# Altium footprint library SamacSys.PcbLib: 1008 footprints (part 24 of 63)
Each footprint in its own frame and in the unit in brackets; x right, y up, seen from the top. Pads: shape width x height; smd on the part's side, far side on the other; paste and mask are expansions set on the pad; w line width, h text height; cw(c..) or ccw(c..) is an arc to the next point about the centre after c.
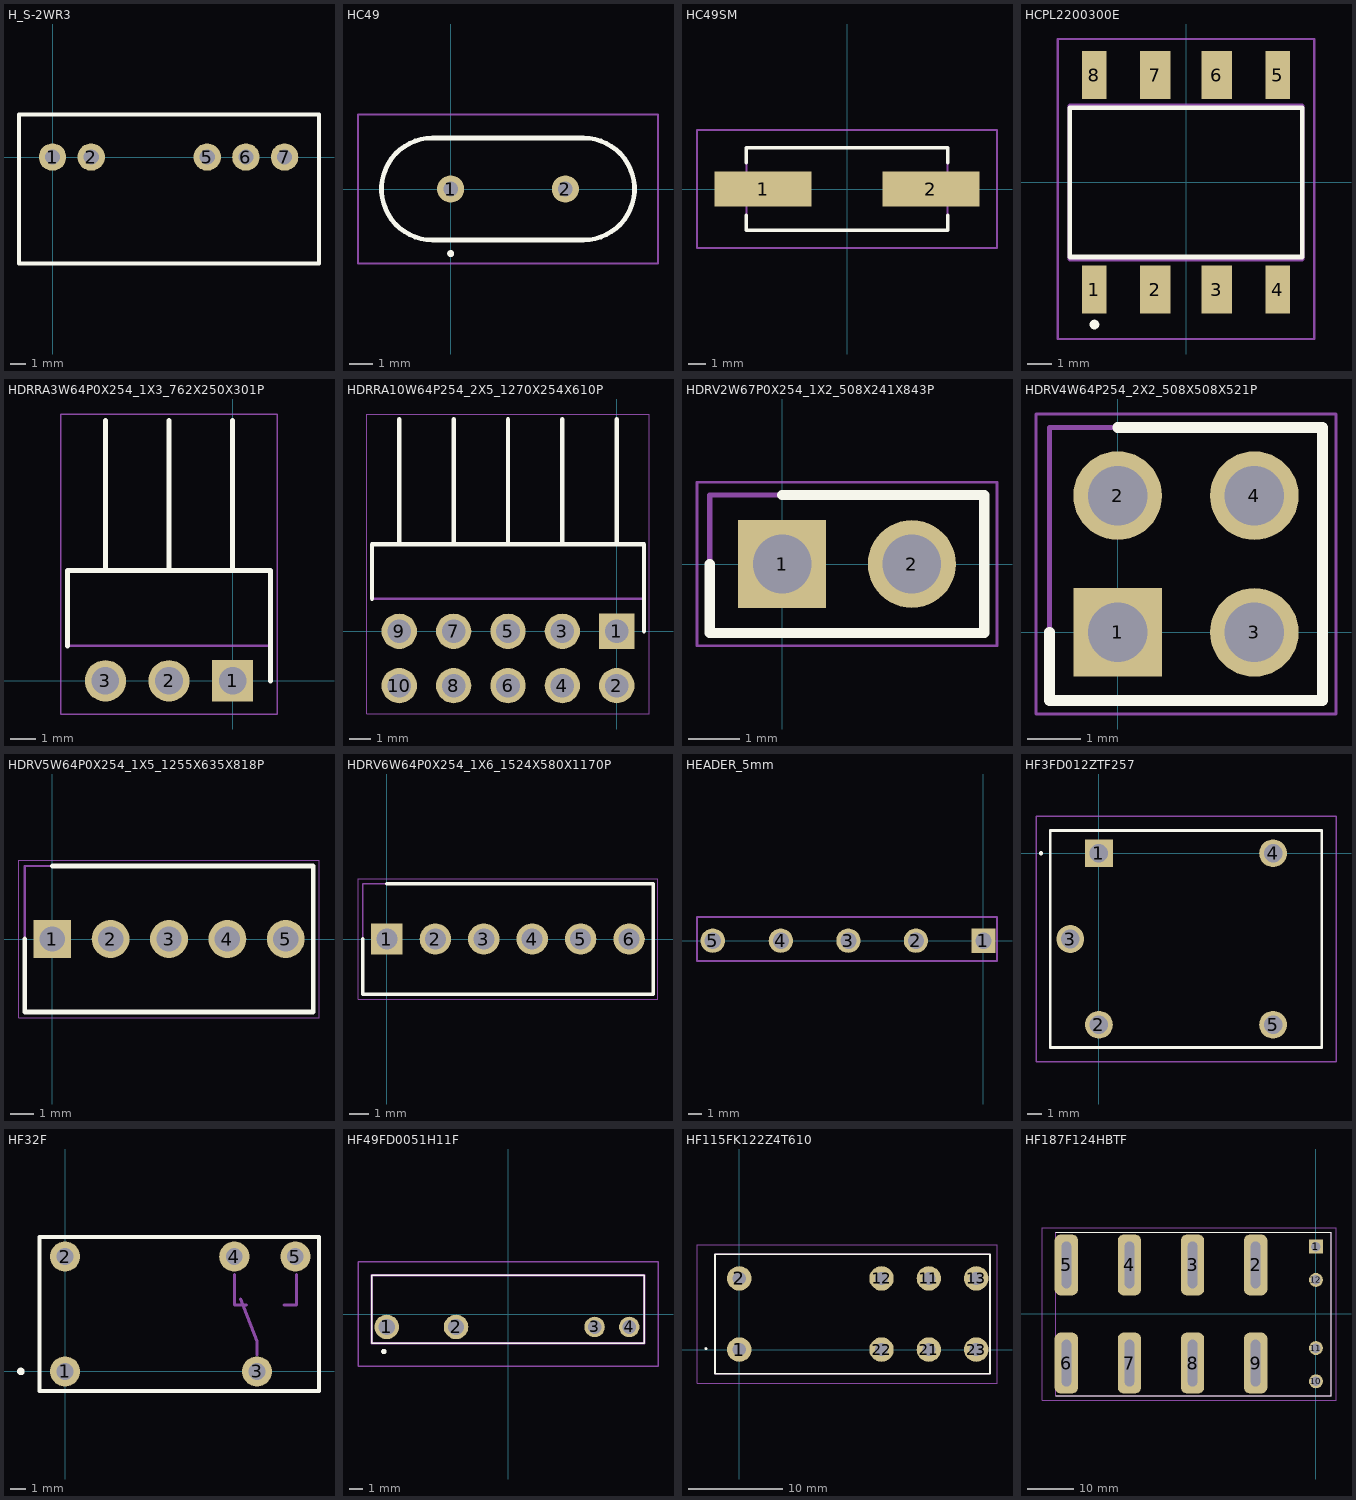
[diagram p23: the footprints below, top view; thin cyan lines are the x and y axes]

## H_S-2WR3 [mm]
height 10.6
pads (5):
  round 1.8 hole 1: 1(0,0) 2(2.54,0) 5(10.16,0) 6(12.7,0) 7(15.24,0)
Top Overlay:
  lines w0.254: -2.2,-7 17.5,-7 17.5,2.8 -2.2,2.8 -2.2,-7
Top Designator:
  text ".Designator" at 1.272,-1.905 h1.52
3D body "(G)H_S-R3.stp": height 12.5, standoff -4.1, extent -2.15,-7 17.35,2.8

## HC49 [mm]
pads (2):
  round 1.155 hole 0.63: 1(0,0) 2(4.88,0)
Top Overlay:
  lines w0.2: 0,-2.8 ccw(c0,-2.75) 0,-2.7 ; 0,-2.8 cw(c0,-2.75) 0,-2.7 ; 0,-2.8 ccw(c0,-2.75) 0,-2.7 ; -0.775,-2.17 cw(c-0.775,0) -0.775,2.17 5.655,2.17 cw(c5.655,0) 5.655,-2.17 -0.775,-2.17
Assembly:
  lines w0.1: -0.775,-2.17 cw(c-0.775,0) -0.775,2.17 5.655,2.17 cw(c5.655,0) 5.655,-2.17 -0.775,-2.17
Countryard:
  lines w0.1: -3.945,-3.17 8.825,-3.17 8.825,3.17 -3.945,3.17 -3.945,-3.17
3D body "HC 49_8MHz.STEP": height 3.5, standoff -3, extent -3.085,-2.325 7.965,2.325

## HC49SM [mm]
pads (2):
  rect 5.5x2 smd: 1(-4.75,0) 2(4.75,0)
Top Overlay:
  lines w0.2: -5.7,-2.35 -5.7,-1.5 -5.7,-2.35 ; -5.7,-2.35 5.7,-2.35 ; -5.7,-2.35 5.7,-2.35 ; -5.7,2.35 -5.7,1.5 -5.7,2.35 ; -5.7,2.35 5.7,2.35 ; -5.7,2.35 5.7,2.35 ; 5.7,-2.35 5.7,-1.5 5.7,-2.35 ; 5.7,2.35 5.7,1.5 5.7,2.35
Assembly:
  lines w0.1: -5.7,-2.35 -5.7,2.35 5.7,2.35 5.7,-2.35 -5.7,-2.35
Countryard:
  lines w0.1: -8.5,-3.35 -8.5,3.35 8.5,3.35 8.5,-3.35 -8.5,-3.35
3D body "HC-49SM.stp": height 4, standoff 0, extent -6.7,-2.4 6.7,2.4

## HCPL2200300E [mm]
pads (8):
  rect 1.016x2 smd: 1(-3.81,-4.45) 4(3.81,-4.45) 5(3.81,4.45) 8(-3.81,4.45)
  rect 1.27x2 smd: 2(-1.27,-4.45) 3(1.27,-4.45) 6(1.27,4.45) 7(-1.27,4.45)
Top Overlay:
  lines w0.2: -4.825,-3.1 4.825,-3.1 4.825,3.1 -4.825,3.1 -4.825,-3.1 ; -3.9,-5.9 cw(c-3.8,-5.9) -3.7,-5.9 cw(c-3.8,-5.9) -3.9,-5.9
Assembly:
  lines w0.2: -4.825,-3.175 4.825,-3.175 4.825,3.175 -4.825,3.175 -4.825,-3.175
Countryard:
  lines w0.1: -5.325,-6.5 5.325,-6.5 5.325,5.95 -5.325,5.95 -5.325,-6.5
3D body "HCPL-2631-300E.stp": height 3.69, standoff 0, extent -5.029,-4.953 5.029,4.953

## HDRRA3W64P0X254_1X3_762X250X301P [mm]
pads (3):
  rect 1.65x1.65 hole 1.1: 1(0,0)
  round 1.65 hole 1.1: 2(-2.54,0) 3(-5.08,0)
Top Overlay:
  lines w0.2: -6.604,1.4 -6.604,4.408 1.524,4.408 1.524,0 ; -5.08,4.408 -5.08,10.408 ; -2.54,4.408 -2.54,10.408 ; 0,4.408 0,10.408
Assembly:
  lines w0.1: -6.604,1.4 -6.604,4.408 1.524,4.408 1.524,1.4 -6.604,1.4
Countryard:
  lines w0.05: -6.854,-1.325 -6.854,10.658 1.774,10.658 1.774,-1.325 -6.854,-1.325
3D body "PH1RB-03-UA.stp": height 3.01, standoff -3.56, extent -6.604,-0.32 1.524,10.916

## HDRRA10W64P254_2X5_1270X254X610P [mm]
pads (10):
  rect 1.65x1.65 hole 1.1: 1(0,0)
  round 1.65 hole 1.1: 2(0,-2.54) 3(-2.54,0) 4(-2.54,-2.54) 5(-5.08,0) 6(-5.08,-2.54) 7(-7.62,0) 8(-7.62,-2.54) 9(-10.16,0) 10(-10.16,-2.54)
Top Overlay:
  lines w0.2: -11.43,1.52 -11.43,4.06 1.27,4.06 1.27,0 ; -10.16,4.06 -10.16,9.9 ; -7.62,4.06 -7.62,9.9 ; -5.08,4.06 -5.08,9.9 ; -2.54,4.06 -2.54,9.9 ; 0,4.06 0,9.9
Assembly:
  lines w0.1: -11.43,1.52 -11.43,4.06 1.27,4.06 1.27,1.52 -11.43,1.52
Countryard:
  lines w0.05: -11.68,-3.865 -11.68,10.15 1.52,10.15 1.52,-3.865 -11.68,-3.865
3D body "HTSW-105-08-G-D-RA.stp": height 6.1, standoff -2.29, extent -11.43,-2.86 1.27,9.9

## HDRV2W67P0X254_1X2_508X241X843P [mm]
pads (2):
  rect 1.725x1.725 hole 1.15: 1(0,0)
  round 1.725 hole 1.15: 2(2.54,0)
Top Overlay:
  lines w0.2: -1.42,0 -1.42,-1.355 3.96,-1.355 3.96,1.355 0,1.355
Assembly:
  lines w0.1: -1.42,-1.355 -1.42,1.355 3.96,1.355 3.96,-1.355 -1.42,-1.355
Countryard:
  lines w0.05: -1.67,-1.605 -1.67,1.605 4.21,1.605 4.21,-1.605 -1.67,-1.605
3D body "10129378-902001BLF.stp": height 8.43, standoff -3.3, extent -1.27,-1.205 3.81,1.205

## HDRV4W64P254_2X2_508X508X521P [mm]
pads (4):
  rect 1.65x1.65 hole 1.1: 1(0,0)
  round 1.65 hole 1.1: 2(0,2.54) 3(2.54,0) 4(2.54,2.54)
Top Overlay:
  lines w0.2: -1.27,0 -1.27,-1.27 3.81,-1.27 3.81,3.81 0,3.81
Assembly:
  lines w0.1: -1.27,-1.27 3.81,-1.27 3.81,3.81 -1.27,3.81 -1.27,-1.27
Countryard:
  lines w0.05: -1.52,-1.52 4.06,-1.52 4.06,4.06 -1.52,4.06 -1.52,-1.52
3D body "TSW-102-05-G-D.stp": height 5.21, standoff -3.3, extent -1.27,-1.27 3.81,3.81

## HDRV5W64P0X254_1X5_1255X635X818P [mm]
pads (5):
  rect 1.65x1.65 hole 1.1: 1(0,0)
  round 1.65 hole 1.1: 2(2.54,0) 3(5.08,0) 4(7.62,0) 5(10.16,0)
Top Overlay:
  lines w0.2: -1.195,0 -1.195,-3.175 11.355,-3.175 11.355,3.175 0,3.175
Assembly:
  lines w0.1: -1.195,-3.175 11.355,-3.175 11.355,3.175 -1.195,3.175 -1.195,-3.175
Countryard:
  lines w0.05: -1.445,-3.425 11.605,-3.425 11.605,3.425 -1.445,3.425 -1.445,-3.425
3D body "22-23-2051.stp": height 10.66, standoff -3.56, extent -1.194,-3.171 11.354,3.179

## HDRV6W64P0X254_1X6_1524X580X1170P [mm]
pads (6):
  rect 1.65x1.65 hole 1.1: 1(0,0)
  round 1.65 hole 1.1: 2(2.54,0) 3(5.08,0) 4(7.62,0) 5(10.16,0) 6(12.7,0)
Top Overlay:
  lines w0.2: -1.27,0 -1.27,-2.9 13.97,-2.9 13.97,2.9 0,2.9
Assembly:
  lines w0.1: -1.27,-2.9 13.97,-2.9 13.97,2.9 -1.27,2.9 -1.27,-2.9
Countryard:
  lines w0.05: -1.52,-3.15 14.22,-3.15 14.22,3.15 -1.52,3.15 -1.52,-3.15
3D body "22-27-2061.stp": height 11.7, standoff -3.56, extent -1.27,-2.9 13.97,2.9

## HEADER_5mm [mm]
pads (5):
  rect 1.8x1.8 hole 1.2 mask+0.076: 1(0,0)
  round 1.8 hole 1.2 mask+0.076: 2(-5,0) 3(-10,0) 4(-15,0) 5(-20.04,0)
Assembly:
  lines w0.127: -21.209,-1.5 1,-1.5 1,1.75 -21.209,1.75 -21.209,-1.5

## HF3FD012ZTF257 [mm]
pads (5):
  rect 1.95x1.95 hole 1.3: 1(0,0)
  round 1.95 hole 1.3: 2(0,-12) 3(-2,-6) 4(12.2,0) 5(12.2,-12)
Top Overlay:
  lines w0.2: -4.1,0 ccw(c-4.05,0) -4,0 ; -4.1,0 cw(c-4.05,0) -4,0 ; -4.1,0 ccw(c-4.05,0) -4,0 ; -3.4,-13.6 15.6,-13.6 15.6,1.6 -3.4,1.6 -3.4,-13.6
Assembly:
  lines w0.1: -3.4,-13.6 15.6,-13.6 15.6,1.6 -3.4,1.6 -3.4,-13.6
Countryard:
  lines w0.1: -4.4,-14.6 16.6,-14.6 16.6,2.6 -4.4,2.6 -4.4,-14.6
3D body "HF3FD_012-ZTF_257_.stp": height 16, standoff -5, extent -3.4,-13.6 15.6,1.6

## HF32F [mm]
pads (5):
  round 2 hole 1.1: 1(0,0) 2(0,7.6) 3(12.7,0) 4(11.2,7.6) 5(15.24,7.6)
Top Overlay:
  circle w0.25: c-2.921,0 r0.125
  lines w0.254: -1.7,-1.3 -1.7,8.9 16.8,8.9 16.8,-1.3 -1.7,-1.3
Assembly:
  lines w0.2: 11.2,6.4 11.2,4.4 12,4.4 ; 11.6,4.8 12.7,2 12.7,1.1 ; 14.5,4.4 15.3,4.4 15.3,6.4
3D body "HF32F Z.stp": height 15.77, standoff -3.53, extent -1.7,-1.4 16.7,8.8

## HF49FD0051H11F [mm]
pads (4):
  round 1.8 hole 1.2: 1(-8.89,-0.95) 2(-3.81,-0.95)
  round 1.5 hole 1: 3(6.35,-0.95) 4(8.89,-0.95)
Top Overlay:
  lines w0.1: -10,-2.15 -10,2.85 10,2.85 10,-2.15 -10,-2.15
  lines w0.2: -9.2,-2.75 ccw(c-9.1,-2.75) -9,-2.75 ccw(c-9.1,-2.75) -9.2,-2.75
Assembly:
  lines w0.2: -10,-2.15 -10,2.85 10,2.85 10,-2.15 -10,-2.15
Countryard:
  lines w0.1: -11,-3.85 -11,3.85 11,3.85 11,-3.85 -11,-3.85
3D body "HF49FD_005-1H11F.stp": height 12.5, standoff -3.5, extent -10.01,-2.13 9.99,2.87

## HF115FK122Z4T610 [mm]
pads (8):
  round 2.6 hole 1.4: 1(0,0) 2(0,7.56) 11(20.16,7.56) 12(15.12,7.56) 13(25.2,7.56) 21(20.16,0) 22(15.12,0) 23(25.2,0)
Top Overlay:
  lines w0.2: -3.6,0.1 cw(c-3.55,0.1) -3.5,0.1 ; -3.6,0.1 ccw(c-3.55,0.1) -3.5,0.1 ; -3.6,0.1 cw(c-3.55,0.1) -3.5,0.1 ; -2.6,-2.57 -2.6,10.13 26.67,10.13 26.67,-2.57 -2.6,-2.57
Assembly:
  lines w0.2: -2.6,-2.57 -2.6,10.13 26.67,10.13 26.67,-2.57 -2.6,-2.57
Countryard:
  lines w0.1: -4.5,-3.57 -4.5,11.13 27.4,11.13 27.4,-3.57 -4.5,-3.57
3D body "HF115FK_12-2Z4T_610_.stp": height 16.1, standoff -5, extent -2.6,-2.57 26.4,10.13

## HF187F124HBTF [mm]
pads (12):
  rect 3x3 hole 2: 1(0,14.4)
  rrect50% 5x13 hole 2 slot 10 at 90 deg: 2(-12.9,10.5) 3(-26.4,10.5) 4(-39.9,10.5) 5(-53.4,10.5) 6(-53.4,-10.5) 7(-39.9,-10.5) 8(-26.4,-10.5) 9(-12.9,-10.5)
  round 3 hole 2 square: 10(0,-14.4)
  round 3 hole 2: 11(0,-7.3) 12(0,7.3)
Top Overlay:
  lines w0.2: -55.7,-17.5 3.3,-17.5 3.3,17.5 -55.7,17.5
Assembly:
  lines w0.1: -55.7,-17.5 -55.7,17.5 3.3,17.5 3.3,-17.5 -55.7,-17.5
Countryard:
  lines w0.1: -58.6,-18.5 -58.6,18.5 4.3,18.5 4.3,-18.5 -58.6,-18.5
3D body "HF187F_12-4HBTF.stp": height 46.87, standoff -4.13, extent -55.71,-17.58 3.29,17.42